# Altium footprint library Other.PcbLib: 67 footprints (part 5 of 5)
Each footprint in its own frame and in the unit in brackets; x right, y up, seen from the top. Pads: shape width x height; smd on the part's side, far side on the other; paste and mask are expansions set on the pad; w line width, h text height; cw(c..) or ccw(c..) is an arc to the next point about the centre after c.
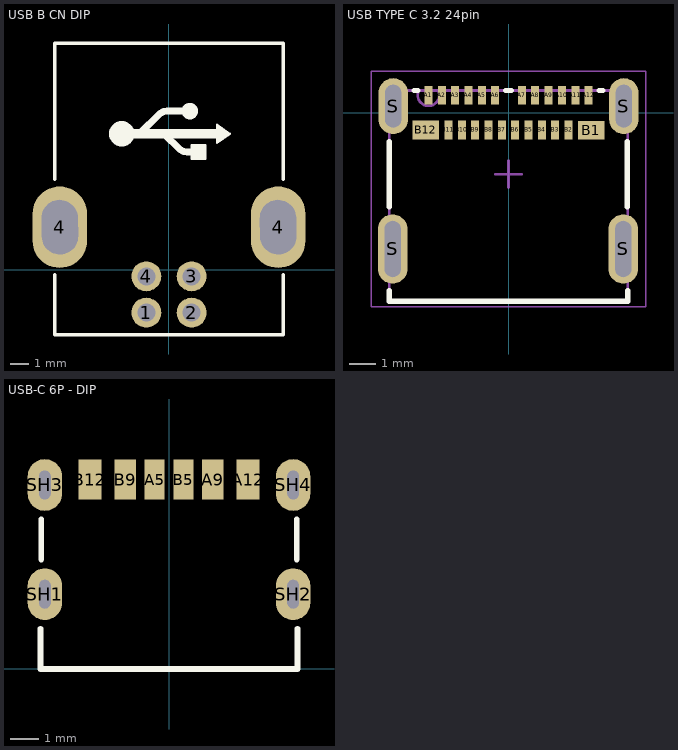
[diagram p4: the footprints below, top view; thin cyan lines are the x and y axes]

## USB B CN DIP [mm]
pads (6):
  round 1.65 hole 1: 1(-1.25,-2.355) 2(1.25,-2.355) 3(1.25,-0.355) 4(-1.25,-0.355)
  oval 3x4.5 hole 2 slot 3 at 91 deg: 4(-6.02,2.355) 4(6.02,2.355)
Top Overlay:
  circle w0.508: c1.145,8.754 r0.2
  circle w0.889: c-2.605,7.504 r0.254
  region: 1.995,6.129 1.245,6.129 1.245,6.879 1.995,6.879
  region: 3.345,7.504 2.645,7.004 2.645,8.004
  lines w0.127: 1.245,6.129 1.995,6.129 1.995,6.879 1.245,6.879 1.245,6.129 ; 2.645,7.004 2.645,8.004 3.345,7.504 2.645,7.004
  lines w0.203: -6.306,-0.281 -6.306,-3.581 6.306,-3.581 6.306,-0.281 ; -6.306,5 -6.306,12.5 6.306,12.5 6.306,5
  lines w0.381: -1.558,7.567 -0.558,8.567 cw(c-0.105,8.114) -0.105,8.754 1.145,8.754 ; -0.208,7.442 0.542,6.692 ccw(c0.995,7.145) 0.995,6.504 1.245,6.504
  lines w0.508: -2.105,7.504 2.645,7.504
3D body "c-0292304-01-b-3d.stp": height 11.61, standoff -3.82, extent -7.195,-3.2 7.195,12.5

## USB TYPE C 3.2 24pin [mm] "USB-C Receptacle Connector 24 Position Surface Mount, 24 Position, Body 8.94x7.90mm"
height 3.24
pads (28):
  rect 0.3x0.7 smd mask+0.051: A1(-3,0.655) A2(-2.5,0.655) A3(-2,0.655) A4(-1.5,0.655) A5(-1,0.655) A6(-0.5,0.655) A7(0.5,0.655) A8(1,0.655) A9(1.5,0.655) A10(2,0.655) A11(2.5,0.655) A12(3,0.655) B2(2.25,-0.645) B3(1.75,-0.645) B4(1.25,-0.645) B5(0.75,-0.645) B6(0.25,-0.645) B7(-0.25,-0.645) B8(-0.75,-0.645) B9(-1.25,-0.645) B10(-1.75,-0.645) B11(-2.25,-0.645)
  rect 1x0.7 smd mask+0.051: B1(3.1,-0.655) B12(-3.1,-0.645)
  oval 1.1x2.6 hole 2.1 slot 0.6 at 0 deg unplated mask+0.051: S(-4.34,-5.105) S(4.3,-5.105)
  oval 1.1x2.1 hole 1.6 slot 0.6 at 0 deg unplated mask+0.051: S(-4.32,0.245) S(4.32,0.245)
Top Overlay:
  lines w0.2: -4.47,-6.675 -4.47,-7.065 4.47,-7.065 4.47,-6.675 ; -4.47,-3.525 -4.47,-1.075 ; -3.54,0.835 -3.465,0.835 -3.4,0.835 ; -0.1,0.835 0,0.835 0.1,0.835 ; 3.39,0.835 3.465,0.835 3.53,0.835 ; 4.45,-3.525 4.45,-1.075
Mechanical 13:
  lines w0.1: -3.368,0.813 ccw(c-3,0.655) -2.632,0.813 ; -4.47,-7.065 4.47,-7.065 4.47,0.835 -4.47,0.835 -4.47,-7.065
Mechanical 15:
  lines w0.05: -5.15,-7.265 5.15,-7.265 5.15,1.55 -5.15,1.55 -5.15,-7.265
  lines w0.1: -0.5,-2.3 0,-2.3 ; 0,-2.8 0,-2.3 ; 0,-1.8 0,-2.3 ; 0.5,-2.3 0,-2.3
3D body "Molex - 1054500101 v7.step": height 3.34, standoff -0.62, extent -4.47,-7.065 4.47,0.835

## USB-C 6P - DIP [mm] "USB-C 6P"
height 3.16
pads (10):
  rect 0.7x1.4 smd: A5(-0.5,6.59) B5(0.5,6.59)
  rect 0.76x1.4 smd: A9(1.52,6.59) B9(-1.52,6.59)
  rect 0.8x1.4 smd: A12(2.75,6.59) B12(-2.75,6.59)
  oval 1.2x1.8 hole 0.4 slot 1 at 90 deg: SH1(-4.32,2.6) SH2(4.32,2.6) SH3(-4.32,6.4) SH4(4.32,6.4)
Top Overlay:
  lines w0.203: -4.47,1.397 -4.47,0 4.47,0 4.47,1.397 ; -4.445,3.81 -4.445,5.207 ; 4.445,3.81 4.445,5.207
3D body "USB Connector Type C female 6pin.STEP": height 3.38, standoff -0.84, extent -4.47,0 4.47,6.87